# Altium schematic symbol library ESP32_connector.SchLib: 4 symbols
Pins are listed as number, name and electrical type; pins without a type are passive.

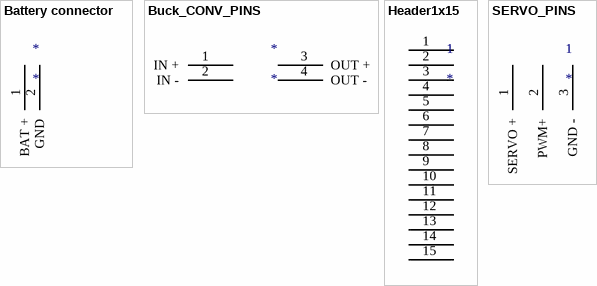
[diagram p0: symbols Battery connector to SERVO_PINS]

## Battery connector
designator *
pins: 1 BAT +, 2 GND

## Buck_CONV_PINS
designator *
pins: 1 IN +, 2 IN -, 3 OUT +, 4 OUT -

## Header1x15
designator 1
1x15 connector for ESP32 dev board
pins: 1, 2, 3, 4, 5, 6, 7, 8, 9, 10, 11, 12, 13, 14, 15

## SERVO_PINS
designator 1
pins: 1 SERVO +, 2 PWM+, 3 GND -